# Altium schematic symbol library STM32G0B1REI6N.SchLib: 1 symbol
Pins are listed as number, name and electrical type; pins without a type are passive.

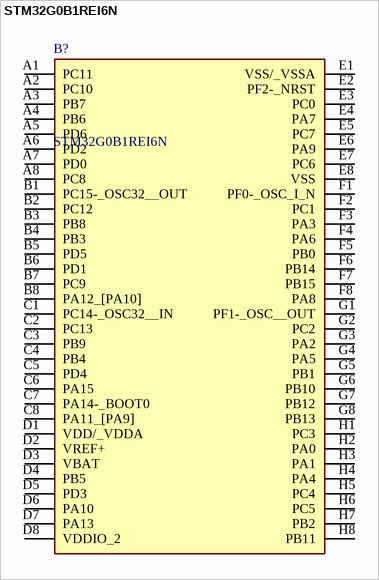
[diagram p0: symbol STM32G0B1REI6N]

## STM32G0B1REI6N
designator B?
Mainstream Arm Cortex-M0+ 32-bit MCU, up to 512KB Flash, 144KB RAM, 6x USART, timers, ADC, DAC, comm. I/Fs, 1.7-3.6V; Manufacturer_Name: STMicroelectronics; Geometry.Height: 0.6mm; Manufacturer_Part_Number: STM32G0B1REI6N; Mouser Part Number: 511-STM32G0B1REI6N; Mouser Price/Stock: https://www.mouser.co.uk/ProductDetail/STMicroelectronics/STM32G0B1REI6N?qs=CiayqK2gdcJ47BEp%2FM0WFg%3D%3D; Arrow Part Number: *; Arrow Price/Stock: *; Datasheet Link: https://www.st.com/resource/en/datasheet/stm32g0b1cc.pdf
footprint BGA64C50P8X8_500X500X60
pins: A1 PC11, A2 PC10, A3 PB7, A4 PB6, A5 PD6, A6 PD2, A7 PD0, A8 PC8, B1 PC15-_OSC32__OUT, B2 PC12, B3 PB8, B4 PB3, B5 PD5, B6 PD1, B7 PC9, B8 PA12_[PA10], C1 PC14-_OSC32__IN, C2 PC13, C3 PB9, C4 PB4, C5 PD4, C6 PA15, C7 PA14-_BOOT0, C8 PA11_[PA9], D1 VDD/_VDDA, D2 VREF+, D3 VBAT, D4 PB5, D5 PD3, D6 PA10, D7 PA13, D8 VDDIO_2, E1 VSS/_VSSA, E2 PF2-_NRST, E3 PC0, E4 PA7, E5 PC7, E6 PA9, E7 PC6, E8 VSS, F1 PF0-_OSC_I_N, F2 PC1, F3 PA3, F4 PA6, F5 PB0, F6 PB14, F7 PB15, F8 PA8, G1 PF1-_OSC__OUT, G2 PC2, G3 PA2, G4 PA5, G5 PB1, G6 PB10, G7 PB12, G8 PB13, H1 PC3, H2 PA0, H3 PA1, H4 PA4, H5 PC4, H6 PC5, H7 PB2, H8 PB11